# Altium footprint library Relay$.PcbLib: 38 footprints (part 1 of 3)
Each footprint in its own frame and in the unit in brackets; x right, y up, seen from the top. Pads: shape width x height; smd on the part's side, far side on the other; paste and mask are expansions set on the pad; w line width, h text height; cw(c..) or ccw(c..) is an arc to the next point about the centre after c.
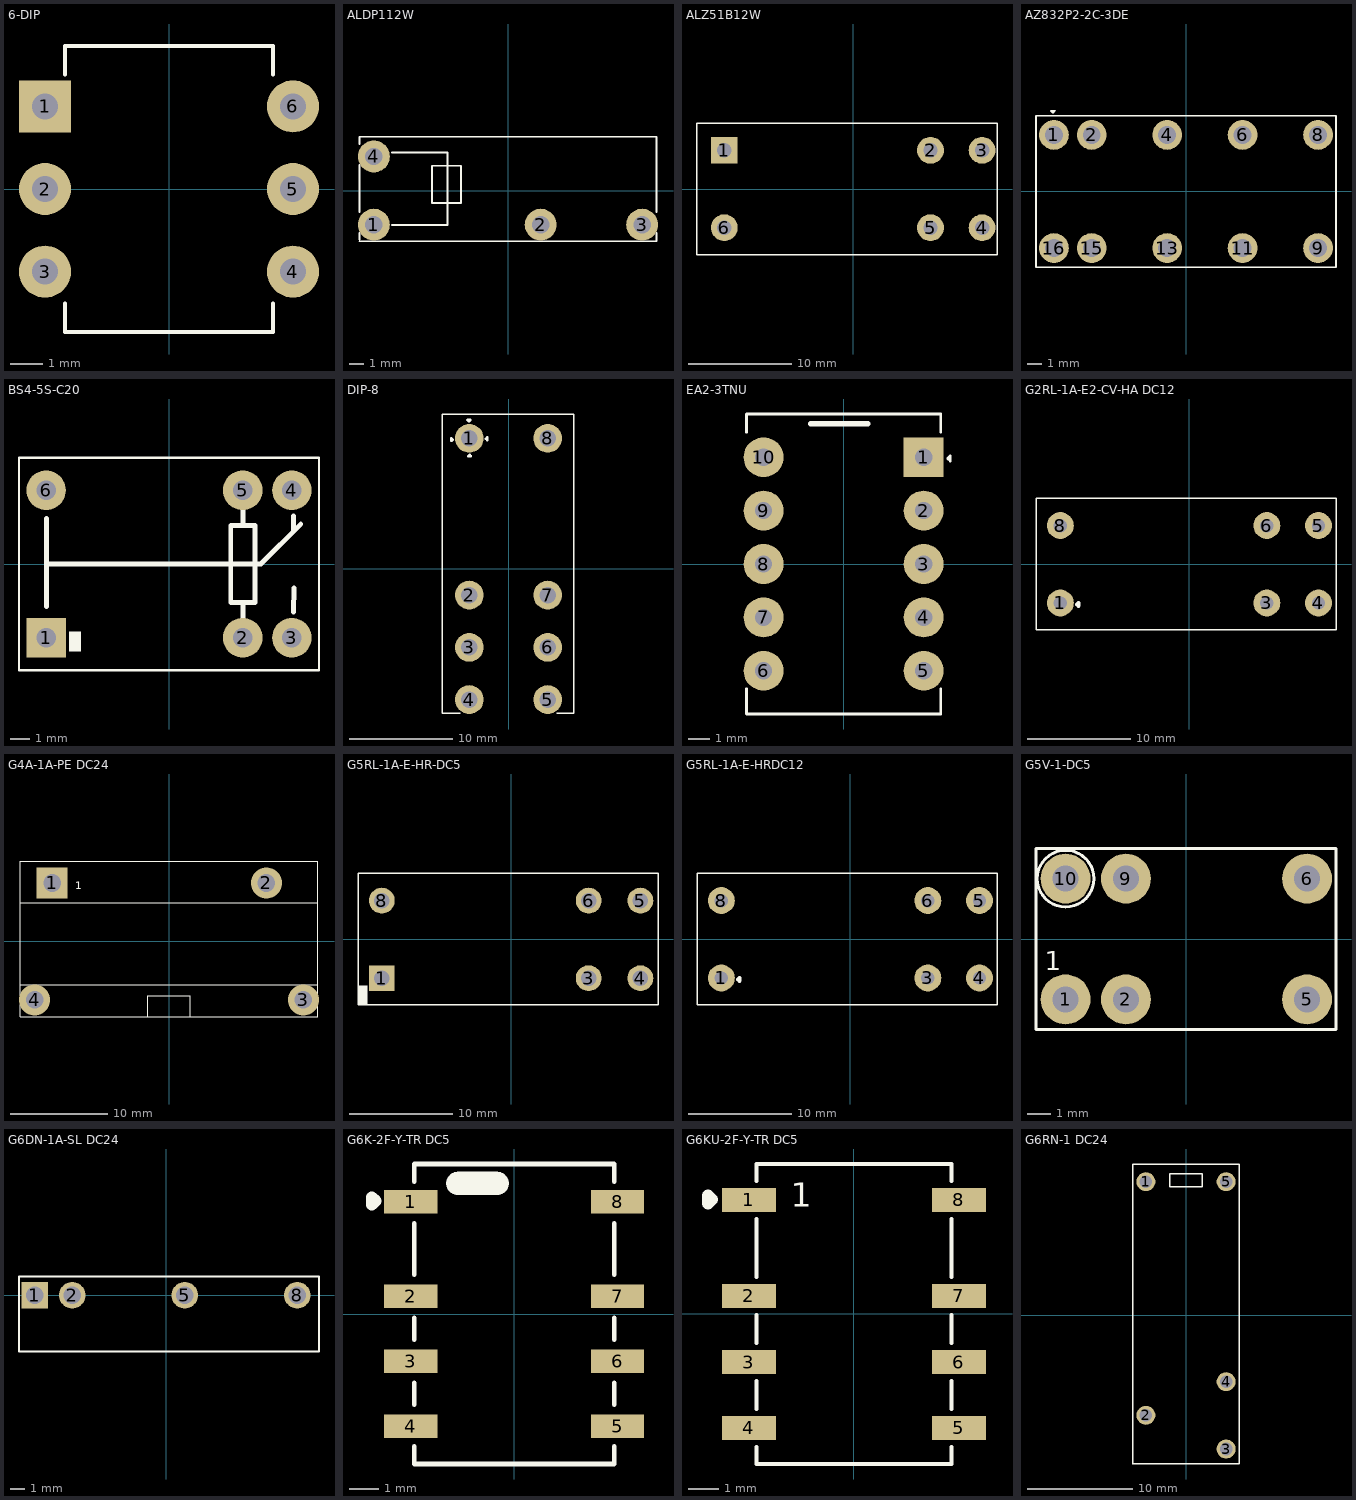
[diagram p0: the footprints below, top view; thin cyan lines are the x and y axes]

## 6-DIP [mm]
pads (6):
  rect 1.6x1.6 / inner round 1.6 / far side rect 1.6x1.6 hole 0.8: 1(-3.81,2.54)
  round 1.6 hole 0.8: 2(-3.81,0) 3(-3.81,-2.54) 4(3.81,-2.54) 5(3.81,0) 6(3.81,2.54)
Top Overlay:
  lines w0.127: -3.2,-3.514 -3.2,-4.4 3.2,-4.4 3.2,-3.514 ; -3.2,3.514 -3.2,4.4 3.2,4.4 3.2,3.514
3D body "PAN_AQV25-DIP6_PAN.step": height 4.24, standoff -2.54, extent -4.064,-4.42 4.064,4.42

## ALDP112W [mm]
pads (4):
  round 2.2 hole 1.2 paste-2539.97 mask+0.051: 1(-9.25,-2.35) 2(2.25,-2.35) 3(9.25,-2.35) 4(-9.25,2.35)
Top Overlay:
  lines w0.127: -10.25,-3.5 10.25,-3.5 10.25,-2.934 ; -10.25,-3.368 -10.25,-2.934 ; -10.25,-1.501 -10.25,1.766 ; -10.25,3.199 -10.25,3.714 10.25,3.714 10.25,-1.501 ; -8,-2.368 -4.17,-2.368 -4.17,2.632 -8,2.632 ; -5.25,-0.868 -3.25,-0.868 -3.251,1.712 -5.25,1.712 -5.25,-0.828 -5.25,-0.868
3D body "C115718.step": height 15.2, standoff -3.5, extent -10.3,-3.508 10.2,3.702

## ALZ51B12W [mm]
pads (6):
  rect 2.6x2.6 hole 1.4 mask+0.102: 1(-12.5,3.75)
  round 2.6 hole 1.4 mask+0.102: 2(7.5,3.75) 3(12.5,3.75) 4(12.5,-3.75) 5(7.5,-3.75) 6(-12.5,-3.75)
Top Overlay:
  lines w0.127: -15.15,-6.4 13.95,-6.4 13.95,6.4 -15.15,6.4 -15.15,-6.4
3D body "PAN_ALZ3_PAN.step": height 15.7, standoff -0.51, extent -15.008,-6.245 13.795,6.252

## AZ832P2-2C-3DE [mm]
pads (10):
  round 2 hole 1.2: 1(-8.89,3.81) 2(-6.35,3.81) 4(-1.27,3.81) 6(3.81,3.81) 8(8.89,3.81) 9(8.89,-3.81) 11(3.81,-3.81) 13(-1.27,-3.81) 15(-6.35,-3.81) 16(-8.89,-3.81)
Top Overlay:
  lines w0.127: -10.1,-5.1 10.1,-5.1 10.1,5.1 -10.1,5.1 -10.1,-5.1 ; -9.106,5.436 -8.826,5.436 -8.954,5.309 -8.979,5.309 -9.106,5.436
3D body "AZ832P2-2C-3DE.STEP": height 11.3, standoff -2.95, extent -10.096,-5.105 10.096,5.105

## BS4-5S-C20 [mm]
pads (6):
  rect 2.04x2.04 hole 1: 1(-6.35,-3.81)
  round 2.04 hole 1: 2(3.81,-3.81) 3(6.35,-3.81) 4(6.35,3.81) 5(3.81,3.81) 6(-6.35,3.81)
Top Overlay:
  rectangle: -5.156,-4.521 -4.547,-3.48
  lines w0.127: -7.75,-5.5 7.75,-5.5 7.75,0 7.75,5.5 -7.75,5.5 -7.75,0 -7.75,-5.5
  lines w0.254: -6.325,-2.21 -6.325,2.362 ; -6.325,0 4.75,0 6.807,2.057 ; 3.813,-2.787 3.813,-1.997 ; 3.813,1.997 3.813,2.787 ; 4.435,-0.01 4.435,-1.997 3.19,-1.997 3.19,0 3.19,1.997 4.435,1.997 4.435,0.01 ; 6.44,-2.475 6.452,-1.245 ; 6.44,1.69 6.44,2.475
3D body "NBC BS4-5S-C20.STEP": height 11.5, standoff -3.6, extent -7.75,-5.5 7.75,5.5

## DIP-8 [mm]
pads (8):
  round 2.8 hole 1.6: 1(-3.81,12.7) 2(-3.81,-2.54) 3(-3.81,-7.62) 4(-3.81,-12.7) 5(3.81,-12.7) 6(3.81,-7.62) 7(3.81,-2.54) 8(3.81,12.7)
Top Overlay:
  lines w0.127: -4.699,-14.046 -6.452,-14.046 -6.452,15.062 6.35,15.062 6.35,-14.046 4.699,-14.046
  lines w0.254: -5.563,12.446 -5.563,12.7 -5.436,12.573 -5.563,12.446 ; -3.988,14.478 -3.734,14.478 -3.861,14.351 -3.988,14.478 ; -3.912,10.973 -3.658,10.973 -3.785,11.1 -3.912,10.973 ; -2.184,12.649 -2.057,12.522 -2.057,12.776 -2.184,12.649
3D body "User Library-845_2P.step": height 18.5, standoff -3, extent -6.401,-13.992 6.299,15.008

## EA2-3TNU [mm]
pads (10):
  rect 1.9x1.9 hole 0.82: 1(3.81,5.08)
  round 1.9 hole 0.82: 2(3.81,2.54) 3(3.81,0) 4(3.81,-2.54) 5(3.81,-5.08) 6(-3.81,-5.08) 7(-3.81,-2.54) 8(-3.81,0) 9(-3.81,2.54) 10(-3.81,5.08)
Top Overlay:
  lines w0.127: -4.623,-5.944 -4.623,-7.137 4.623,-7.137 4.623,-5.944 ; -4.623,6.274 -4.623,7.137 4.623,7.137 4.623,6.274 ; 4.953,5.029 5.08,5.156 5.08,4.902 4.953,5.029
  lines w0.254: -1.575,6.68 1.143,6.68
3D body "EA2-3TNU.step": height 5.05, standoff -4.05, extent -4.628,-7.1 4.572,7.1

## G2RL-1A-E2-CV-HA DC12 [mm]
pads (6):
  round 2.6 hole 1.3: 1(-12.5,-3.75) 3(7.5,-3.75) 4(12.5,-3.75) 5(12.5,3.75) 6(7.5,3.75) 8(-12.5,3.75)
Top Overlay:
  lines w0.127: -14.859,-6.35 14.199,-6.35 14.199,6.401 -14.859,6.401 -14.859,-6.35
  lines w0.4: -10.871,-3.886 -10.744,-3.759 -10.744,-4.013 -10.871,-3.886
3D body "G2RL-1A-E2-CV-HA DC12--3DModel-STEP-1.STEP": height 16.7, standoff -3.5, extent -14.856,-6.299 14.144,6.401

## G4A-1A-PE DC24 [mm]
pads (4):
  rect 3.2x3.2 hole 1.8 paste-2539.97 mask+0.051: 1(-12,6)
  round 3.2 hole 1.8 paste-2539.97 mask+0.051: 2(10,6) 3(13.8,-6) 4(-13.8,-6)
Top Overlay:
  lines w0.127: -15.25,-7.75 15.25,-7.75 15.25,-6.487 ; -15.25,-4.45 15.25,-4.45 ; -15.25,8.25 15.25,8.25 15.25,-5.512 ; -15.249,-7.75 -15.249,-6.489 ; -15.249,-5.51 -15.249,8.25 ; -15.249,3.985 15.25,3.985 ; -2.187,-7.75 -2.187,-5.588 2.159,-5.588 2.159,-7.75
  text "1" at -9.604,5.356 h0.8
3D body "G4A-1A-PE DC24.STEP": height 26.8, standoff -3.5, extent -15.25,-7.796 15.25,8.204

## G5RL-1A-E-HR-DC5 [mm]
pads (6):
  rect 2.5x2.5 hole 1.5: 1(-12.501,-3.75)
  round 2.5 hole 1.5: 3(7.499,-3.75) 4(12.501,-3.75) 5(12.501,3.75) 6(7.499,3.75) 8(-12.501,3.75)
Top Overlay:
  rectangle: -14.8,-6.319 -13.864,-4.478
  lines w0.127: -14.8,-6.319 14.2,-6.319 ; 14.2,-6.299 14.2,6.401 ; -14.8,6.401 -14.8,-6.299 -14.8,6.401 ; -14.8,6.401 14.2,6.401 ; -14.8,6.401 14.2,6.401
3D body "C113250.step": height 16.2, standoff -3, extent -14.823,-6.338 14.177,6.372

## G5RL-1A-E-HRDC12 [mm]
pads (6):
  round 2.6 hole 1.3: 1(-12.5,-3.75) 3(7.5,-3.75) 4(12.5,-3.75) 5(12.5,3.75) 6(7.5,3.75) 8(-12.5,3.75)
Top Overlay:
  lines w0.127: -14.859,-6.35 14.199,-6.35 14.199,6.401 -14.859,6.401 -14.859,-6.35
  lines w0.4: -10.871,-3.886 -10.744,-3.759 -10.744,-4.013 -10.871,-3.886
3D body "G5RL_1A_E_HR.step": height 15.7, standoff -3.5, extent -14.83,-6.325 14.17,6.375

## G5V-1-DC5 [mm]
pads (6):
  round 2.1 hole 1.1 paste-2539.97 mask+0.051: 1(-5.08,-2.54) 2(-2.54,-2.54) 5(5.08,-2.54) 6(5.08,2.54) 9(-2.54,2.54) 10(-5.08,2.54)
Top Overlay:
  circle w0.127: c-5.08,2.54 r1.194
  lines w0.127: -6.325,-3.81 -6.325,3.81 6.299,3.81 6.299,-3.81 -6.325,-3.81
  text "1" at -5.947,-1.324 h0.8
3D body "G5V-1 DC5.step1.STEP": height 10.3, standoff -2.6, extent -6.25,-3.75 6.25,3.76

## G6DN-1A-SL DC24 [mm]
pads (4):
  rect 1.8x1.8 hole 1.2 paste-2539.97 mask+0.051: 1(-8.89,0)
  round 1.8 hole 1.2 paste-2539.97 mask+0.051: 2(-6.35,0) 5(1.27,0) 8(8.89,0)
Top Overlay:
  lines w0.127: -9.959,-3.808 -9.959,1.272 10.361,1.272 10.361,-3.808 -9.959,-3.808
3D body "C397209.step": height 12.3, standoff -3, extent -9.75,-3.809 10.25,1.281

## G6K-2F-Y-TR DC5 [mm]
pads (8):
  rect 1.8x0.8 smd: 1(-3.5,3.8) 2(-3.5,0.6) 3(-3.5,-1.6) 4(-3.5,-3.8) 5(3.5,-3.8) 6(3.5,-1.6) 7(3.5,0.6) 8(3.5,3.8)
Top Overlay:
  rectangle: -1.905,4.086 -0.58,4.754
  region: -0.58,4.754 -0.361,4.671 -0.255,4.507 -0.255,4.342 -0.512,4.086 -0.58,4.086
  region: -1.905,4.754 -2.125,4.671 -2.23,4.507 -2.23,4.342 -1.973,4.086 -1.905,4.086
  lines w0.127: -1.905,4.086 cw(c-1.905,4.42) -1.905,4.754 -0.58,4.754 cw(c-0.58,4.42) -0.58,4.086 -1.905,4.086
  lines w0.152: -3.377,-4.482 -3.377,-5.076 3.377,-5.076 3.377,-4.482 ; -3.377,-3.067 -3.377,-2.333 ; -3.377,-0.867 -3.377,-0.133 ; -3.377,1.333 -3.377,3.067 ; -3.377,4.482 -3.377,5.076 3.377,5.076 3.377,4.482 ; 3.377,-3.067 3.377,-2.333 ; 3.377,-0.867 3.377,-0.133 ; 3.377,1.333 3.377,3.067
  lines w0.4: -4.821,3.698 -4.694,3.825 -4.821,3.952 -4.821,3.698
3D body "G6K-2F-Y-TR DC5.STEP": height 5.2, standoff 0, extent -3.9,-5 3.9,5

## G6KU-2F-Y-TR DC5 [mm]
pads (8):
  rect 1.8x0.8 smd paste+0 mask+0.05: 1(-3.5,3.8) 2(-3.5,0.6) 3(-3.5,-1.6) 4(-3.5,-3.8) 5(3.5,-3.8) 6(3.5,-1.6) 7(3.5,0.6) 8(3.5,3.8)
Top Overlay:
  lines w0.127: -3.25,-4.431 -3.25,-5 3.25,-5 3.25,-4.431 ; -3.25,-3.169 -3.25,-2.231 ; -3.25,-0.969 -3.25,-0.031 ; -3.25,1.231 -3.25,3.169 ; -3.25,4.431 -3.25,5 3.25,5 3.25,4.431 ; 3.25,-3.169 3.25,-2.231 ; 3.25,-0.969 3.25,-0.031 ; 3.25,1.231 3.25,3.169
  lines w0.4: -4.866,3.688 -4.866,3.942 -4.739,3.815 -4.866,3.688
  text "1" at -2.108,3.581 h0.8
3D body "G6KU_2F_Y.step": height 5.2, standoff 0, extent -3.9,-5.015 3.9,4.985

## G6RN-1 DC24 [mm]
pads (5):
  round 1.8 hole 1.2: 1(-3.81,12.7) 2(-3.81,-9.5) 3(3.81,-12.7) 4(3.81,-6.3) 5(3.81,12.7)
Top Overlay:
  lines w0.127: -5.08,-14.123 5.08,-14.123 5.08,14.377 -5.08,14.377 -5.08,-14.123 ; -1.524,12.192 -1.524,13.462 1.524,13.462 1.524,12.192 -1.524,12.192
3D body "C397134.step": height 14.5, standoff -4, extent -5,-14.15 5.01,14.35